# Altium schematic symbol library 131M61.SchLib: 1 symbol
Pins are listed as number, name and electrical type; pins without a type are passive.

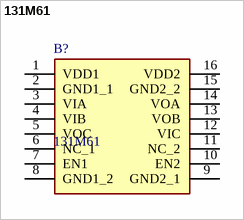
[diagram p0: symbol 131M61]

## 131M61
designator B?
IC: interface; digital isolator; 10Mbps; iDivider; 35.5VDC; SMD; Manufacturer_Name: 2Pai Semi; Manufacturer_Part_Number: Π131M61; Geometry.Height: 2.65mm; TME Electronic Components Part Number: *; TME Electronic Components Price/Stock: *; Datasheet Link: https://www.rpsemi.com/d.php?id=1593
footprint SOIC127P1030X265-16N
pins: 1 VDD1, 2 GND1_1, 3 VIA, 4 VIB, 5 VOC, 6 NC_1, 7 EN1, 8 GND1_2, 9 GND2_1, 10 EN2, 11 NC_2, 12 VIC, 13 VOB, 14 VOA, 15 GND2_2, 16 VDD2